# Altium footprint library BAT_1123.PcbLib: 1 footprints
Each footprint in its own frame and in the unit in brackets; x right, y up, seen from the top. Pads: shape width x height; smd on the part's side, far side on the other; paste and mask are expansions set on the pad; w line width, h text height; cw(c..) or ccw(c..) is an arc to the next point about the centre after c.
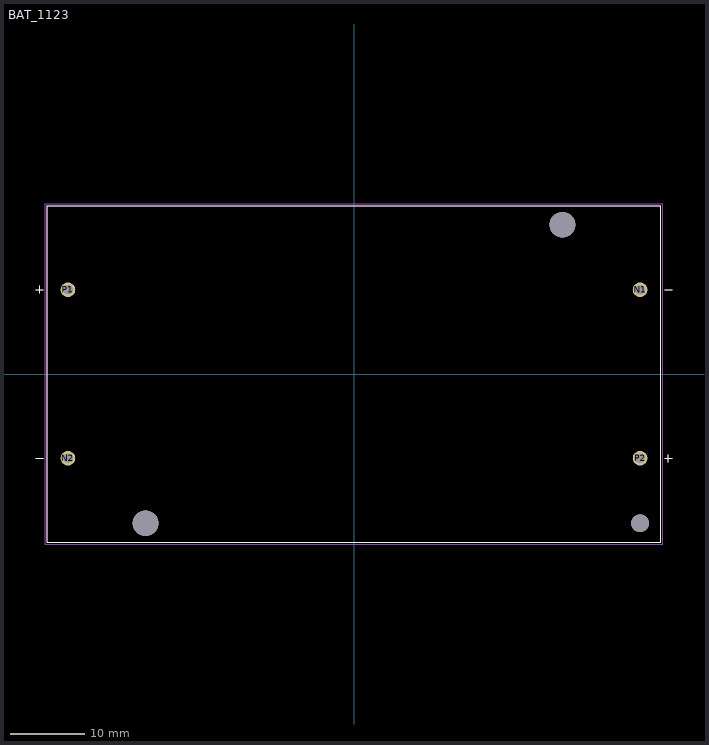
[diagram p0: the footprint, top view; thin cyan lines are the x and y axes]

## BAT_1123 [mm]
height 17.52
pads (7):
  round 1.98 hole 1.32: N1(38.33,11.28) N2(-38.33,-11.28) P1(-38.33,11.28) P2(38.33,-11.28)
  round 3.45 hole 3.45 unplated: ""(-27.925,-20) ""(27.925,20)
  round 2.39 hole 2.39 unplated: ""(38.33,-20)
Top Overlay:
  lines w0.127: -42.63,-11.28 -41.63,-11.28 ; -42.63,11.32 -41.63,11.32 ; -42.13,10.82 -42.13,11.82 ; 41.63,-11.32 42.63,-11.32 ; 41.63,11.28 42.63,11.28 ; 42.13,-11.82 42.13,-10.82 ; -41.095,-22.555 41.095,-22.555 41.095,22.555 -41.095,22.555 -41.095,-22.555
Assembly Top:
  lines w0.127: -42.63,-11.28 -41.63,-11.28 ; -42.63,11.32 -41.63,11.32 ; -42.13,10.82 -42.13,11.82 ; 41.63,-11.32 42.63,-11.32 ; 41.63,11.28 42.63,11.28 ; 42.13,-11.82 42.13,-10.82 ; -41.095,-22.555 41.095,-22.555 41.095,22.555 -41.095,22.555 -41.095,-22.555
Courtyard Top:
  lines w0.05: -41.345,-22.805 41.345,-22.805 41.345,22.805 -41.345,22.805 -41.345,-22.805
3D body "step_temp.STEP": height 17.54, standoff -3.44, extent -41.275,-22.838 41.275,22.584